# Altium footprint library MainController.PcbLib: 68 footprints (part 5 of 5)
Each footprint in its own frame and in the unit in brackets; x right, y up, seen from the top. Pads: shape width x height; smd on the part's side, far side on the other; paste and mask are expansions set on the pad; w line width, h text height; cw(c..) or ccw(c..) is an arc to the next point about the centre after c.
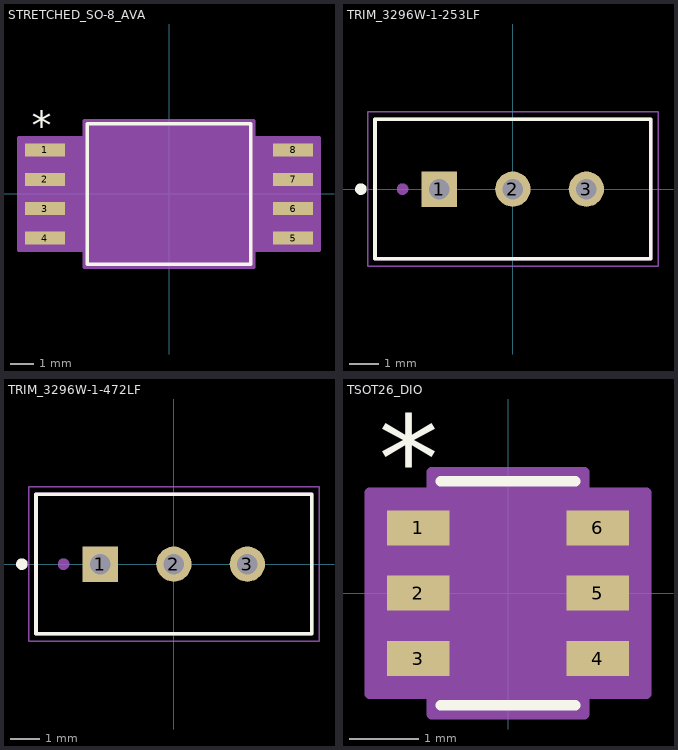
[diagram p4: the footprints below, top view; thin cyan lines are the x and y axes]

## STRETCHED_SO-8_AVA [mil]
pads (8):
  rect 68x22 smd paste+0 mask+0: 1(-211.5,75) 2(-211.5,25) 3(-211.5,-25) 4(-211.5,-75) 5(211.5,-75) 6(211.5,-25) 7(211.5,25) 8(211.5,75)
Top Overlay:
  lines w6: -139,-120 -139,120 139,120 139,-120 -139,-120
  text "*" at -234,92 h50
  text ".Designator" at -137.5,-25 h50
Mechanical 13:
  lines w1: -12,115 ccw(c0,115) 12,115 ; -231.5,-85 -134,-85 -134,-65 -231.5,-65 -231.5,-85 ; -231.5,-35 -134,-35 -134,-15 -231.5,-15 -231.5,-35 ; -231.5,15 -134,15 -134,35 -231.5,35 -231.5,15 ; -231.5,65 -134,65 -134,85 -231.5,85 -231.5,65 ; -134,-115 -134,115 134,115 134,-115 -134,-115 ; 134,-85 231.5,-85 231.5,-65 134,-65 134,-85 ; 134,-35 231.5,-35 231.5,-15 134,-15 134,-35 ; 134,15 231.5,15 231.5,35 134,35 134,15 ; 134,65 231.5,65 231.5,85 134,85 134,65
  text ".Designator" at -137.5,-25 h50
  text "*" at -131.5,62 h50
Mechanical 15:
  region: -144,-96 -255.5,-96 -255.5,96 -144,96 -144,125 144,125 144,96 255.5,96 255.5,-96 144,-96 144,-125 -144,-125
  lines w6: -255.5,-96 -144,-96 -144,-125 144,-125 144,-96 255.5,-96 255.5,96 144,96 144,125 -144,125 -144,96 -255.5,96 -255.5,-96
3D body "STRETCHED_SO-8_AVA.step": height 130.12, standoff 0, extent -231.5,-115 231.5,115

## TRIM_3296W-1-253LF [mm]
pads (3):
  rect 1.218x1.218 / inner round 1.218 / far side rect 1.218x1.218 hole 0.71 mask+0.102: 1(-2.54,0)
  round 1.218 hole 0.71 mask+0.102: 2(0,0) 3(2.54,0)
Top Overlay:
  circle w0.2: c-5.25,0 r0.1
  lines w0.127: -4.765,-2.41 4.765,-2.41 4.765,2.42 -4.765,2.42 -4.765,-2.41
Mechanical 13:
  circle w0.2: c-3.81,0 r0.1
  lines w0.127: -4.765,-2.41 -4.765,2.42 4.765,2.42 4.765,-2.41 -4.765,-2.41
Mechanical 15:
  lines w0.05: -5.015,-2.66 -5.015,2.67 5.015,2.67 5.015,-2.66 -5.015,-2.66
3D body "step_temp.STEP": height 11.55, standoff -7.72, extent -4.765,-2.41 4.765,2.42

## TRIM_3296W-1-472LF [mm]
pads (3):
  rect 1.218x1.218 / inner round 1.218 / far side rect 1.218x1.218 hole 0.71 mask+0.102: 1(-2.54,0)
  round 1.218 hole 0.71 mask+0.102: 2(0,0) 3(2.54,0)
Top Overlay:
  circle w0.2: c-5.25,0 r0.1
  lines w0.127: -4.765,-2.41 4.765,-2.41 4.765,2.42 -4.765,2.42 -4.765,-2.41
Mechanical 13:
  circle w0.2: c-3.81,0 r0.1
  lines w0.127: -4.765,-2.41 -4.765,2.42 4.765,2.42 4.765,-2.41 -4.765,-2.41
Mechanical 15:
  lines w0.05: -5.015,-2.66 -5.015,2.67 5.015,2.67 5.015,-2.66 -5.015,-2.66
3D body "step_temp.STEP": height 11.55, standoff -7.72, extent -4.765,-2.41 4.765,2.42

## TSOT26_DIO [mil]
pads (6):
  rect 35.5x20 smd paste+0 mask+0: 1(-51.25,37.4) 2(-51.25,0) 3(-51.25,-37.4) 4(51.25,-37.4) 5(51.25,0) 6(51.25,37.4)
Top Overlay:
  lines w6: -38.5,-64 38.5,-64 ; -38.5,64 38.5,64
  text "*" at -73.75,52.4 h50
  text ".Designator" at -137.5,-25 h50
Mechanical 13:
  lines w1: -12,59 ccw(c0,59) 12,59 ; -55,-46.4 -33.5,-46.4 -33.5,-28.4 -55,-28.4 -55,-46.4 ; -55,-9 -33.5,-9 -33.5,9 -55,9 -55,-9 ; -55,28.4 -33.5,28.4 -33.5,46.4 -55,46.4 -55,28.4 ; -33.5,-59 -33.5,59 33.5,59 33.5,-59 -33.5,-59 ; 33.5,-46.4 55,-46.4 55,-28.4 33.5,-28.4 33.5,-46.4 ; 33.5,-9 55,-9 55,9 33.5,9 33.5,-9 ; 33.5,28.4 55,28.4 55,46.4 33.5,46.4 33.5,28.4
  text ".Designator" at -137.5,-25 h50
  text "*" at -31,6 h50
Mechanical 15:
  region: -43.5,-57.4 -79,-57.4 -79,57.4 -43.5,57.4 -43.5,69 43.5,69 43.5,57.4 79,57.4 79,-57.4 43.5,-57.4 43.5,-69 -43.5,-69
  lines w6: -79,-57.4 -43.5,-57.4 -43.5,-69 43.5,-69 43.5,-57.4 79,-57.4 79,57.4 43.5,57.4 43.5,69 -43.5,69 -43.5,57.4 -79,57.4 -79,-57.4
3D body "TSOT26_DIO.step": height 39.09, standoff 0, extent -55,-59.02 55,59.02